# EAGLE library part USB-C (library pixel)
USB Type-C USB 2.0 Connector
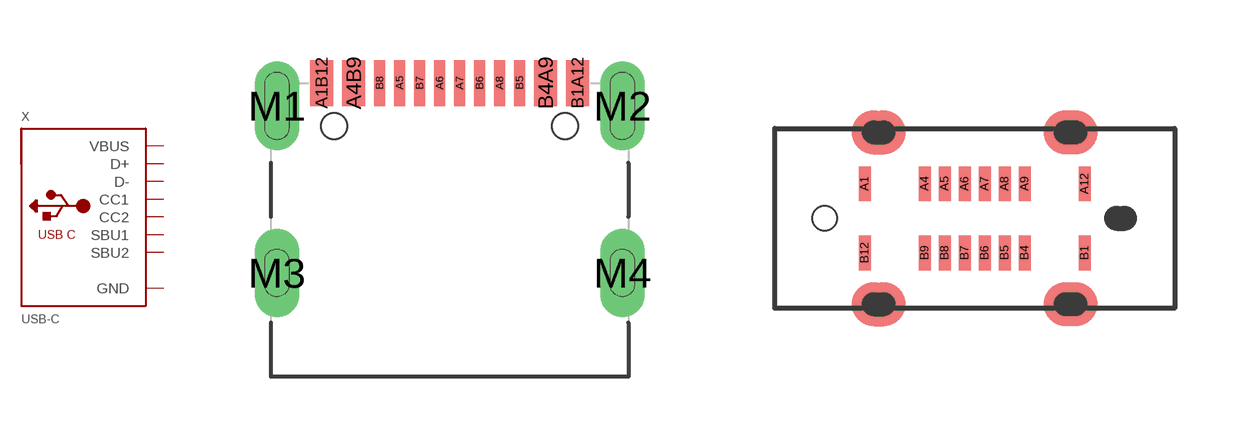
[diagram p20: symbol with the pads of USB-C; footprints USB-C, USB-C-VERTICAL]

Designator prefix X

## USB-C  [USB-C]
A1B12  GND  pwr
A4B9  VBUS  pwr
A5  CC1
A6  D+
A7  D-
A8  SBU1
B1A12  GND  pwr
B4A9  VBUS  pwr
B5  CC2
B6  D+
B7  D-
B8  SBU2
M1  GND  pwr
M2  GND  pwr
M3  GND  pwr
M4  GND  pwr

## USB-CVERTICAL  [USB-C-VERTICAL]
A1  GND  pwr
A4  VBUS  pwr
A5  CC1
A6  D+
A7  D-
A8  SBU1
A9  VBUS  pwr
A12  GND  pwr
B1  GND  pwr
B4  VBUS  pwr
B5  CC2
B6  D+
B7  D-
B8  SBU2
B9  VBUS  pwr
B12  GND  pwr

## Footprint USB-C (pad centres in mm)
smd 0.575 x 1.15: A1B12 -3.2,3.545; A4B9 -2.4,3.545; B1A12 3.2,3.545; B4A9 2.4,3.545
smd 0.275 x 1.15: A5 -1.25,3.545; A6 -0.25,3.545; A7 0.25,3.545; A8 1.25,3.545; B5 1.75,3.545; B6 0.75,3.545; B7 -0.75,3.545; B8 -1.75,3.545
drill 0.6 pad 1 long: M1 -4.32,2.97; M2 4.32,2.97; M3 -4.32,-1.21; M4 4.32,-1.21
hole 0.65 at 2.89,2.47
hole 0.65 at -2.89,2.47

## Footprint USB-C-VERTICAL (pad centres in mm)
smd 0.3 x 0.87: A1 -2.75,0.865; A4 -1.25,0.865; A5 -0.75,0.865; A6 -0.25,0.865; A7 0.25,0.865; A8 0.75,0.865; A9 1.25,0.865; A12 2.75,0.865; B1 2.75,-0.865; B4 1.25,-0.865; B5 0.75,-0.865; B6 0.25,-0.865; B7 -0.25,-0.865; B8 -0.75,-0.865; B9 -1.25,-0.865; B12 -2.75,-0.865
hole 0.62 at -3.75,0